# Altium footprint library CRG0402F3K9.PcbLib: 3 footprints
Each footprint in its own frame and in the unit in brackets; x right, y up, seen from the top. Pads: shape width x height; smd on the part's side, far side on the other; paste and mask are expansions set on the pad; w line width, h text height; cw(c..) or ccw(c..) is an arc to the next point about the centre after c.
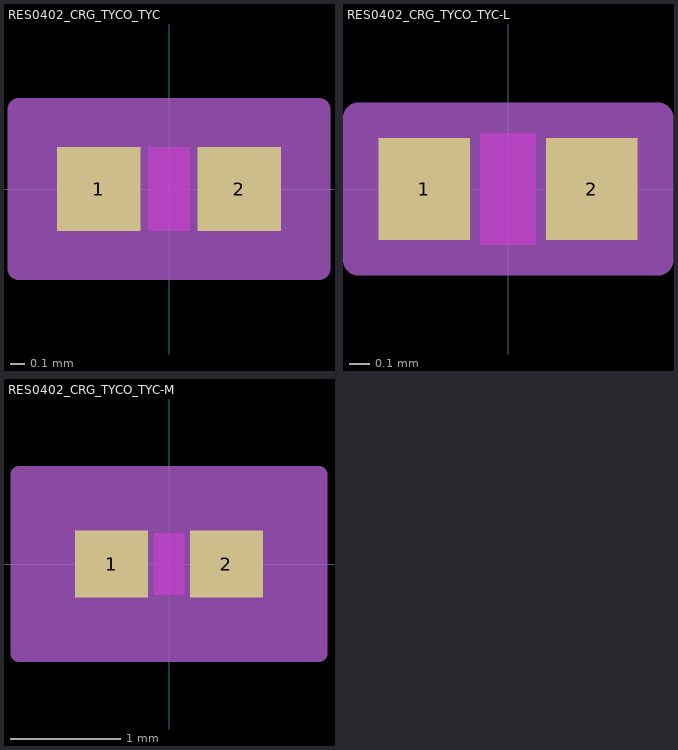
[diagram p0: the footprints below, top view; thin cyan lines are the x and y axes]

## RES0402_CRG_TYCO_TYC [mil]
pads (2):
  rect 22x22 smd paste+0 mask+0: 1(-18.5,0) 2(18.5,0)
Top Layer keep-out:
  region: -5.5,-9 -5.5,9 5.5,9 5.5,-9
Top Overlay:
  text ".Designator" at -137.5,-25 h50
Keep-Out Layer:
  region: -5.5,-11 -5.5,11 5.5,11 5.5,-11
Mechanical 13:
  lines w1: -21.5,-11 -21.5,11 ; -21.5,-11 -7.5,-11 -7.5,11 -21.5,11 ; -21.5,-11 21.5,-11 ; -21.5,-11 -21.5,11 ; -21.5,11 21.5,11 ; 21.5,-11 7.5,-11 7.5,11 21.5,11 ; 21.5,-11 21.5,11 ; 21.5,-11 21.5,11
  text ".Designator" at -137.5,-25 h50
Mechanical 15:
  region: 39.5,-21 -39.5,-21 -39.5,21 39.5,21
  lines w6: -39.5,-21 -39.5,21 39.5,21 39.5,-21 -39.5,-21
3D body "RES0402_CRG_TYCO_TYC.step": height 15.98, standoff 0, extent -21.5,-10.98 21.5,10.98

## RES0402_CRG_TYCO_TYC-L [mil]
pads (2):
  rect 18x20 smd paste+0 mask+0: 1(-16.5,0) 2(16.5,0)
Top Layer keep-out:
  region: -5.5,-9 -5.5,9 5.5,9 5.5,-9
Top Overlay:
  text ".Designator" at -137.5,-25 h50
Keep-Out Layer:
  region: -5.5,-11 -5.5,11 5.5,11 5.5,-11
Mechanical 13:
  lines w1: -21.5,-11 -21.5,11 ; -21.5,-11 -7.5,-11 -7.5,11 -21.5,11 ; -21.5,-11 21.5,-11 ; -21.5,-11 -21.5,11 ; -21.5,11 21.5,11 ; 21.5,-11 7.5,-11 7.5,11 21.5,11 ; 21.5,-11 21.5,11 ; 21.5,-11 21.5,11
  text ".Designator" at -137.5,-25 h50
Mechanical 15:
  region: 29.5,-14 -29.5,-14 -29.5,14 29.5,14
  lines w6: -29.5,-14 -29.5,14 29.5,14 29.5,-14 -29.5,-14
3D body "RES0402_CRG_TYCO_TYC.step": height 15.98, standoff 0, extent -21.5,-10.98 21.5,10.98

## RES0402_CRG_TYCO_TYC-M [mil]
pads (2):
  rect 26x24 smd paste+0 mask+0: 1(-20.5,0) 2(20.5,0)
Top Layer keep-out:
  region: -5.5,-9 -5.5,9 5.5,9 5.5,-9
Top Overlay:
  text ".Designator" at -137.5,-25 h50
Keep-Out Layer:
  region: -5.5,-11 -5.5,11 5.5,11 5.5,-11
Mechanical 13:
  lines w1: -21.5,-11 -21.5,11 ; -21.5,-11 -7.5,-11 -7.5,11 -21.5,11 ; -21.5,-11 21.5,-11 ; -21.5,-11 -21.5,11 ; -21.5,11 21.5,11 ; 21.5,-11 7.5,-11 7.5,11 21.5,11 ; 21.5,-11 21.5,11 ; 21.5,-11 21.5,11
  text ".Designator" at -137.5,-25 h50
Mechanical 15:
  region: 53.5,-32 -53.5,-32 -53.5,32 53.5,32
  lines w6: -53.5,-32 -53.5,32 53.5,32 53.5,-32 -53.5,-32
3D body "RES0402_CRG_TYCO_TYC.step": height 15.98, standoff 0, extent -21.5,-10.98 21.5,10.98